# Altium schematic symbol library 2mmSch.SchLib: 2 symbols
Pins are listed as number, name and electrical type; pins without a type are passive.

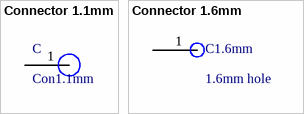
[diagram p0: symbols Connector 1.1mm to Connector 1.6mm]

## Connector 1.1mm
designator C, comment Con1.1mm
Connector Pad 1.1mm
footprint PCBComponent_1 - duplicate
pins: 1

## Connector 1.6mm
designator C1.6mm, comment 1.6mm hole
1.6mm Connector Hole
footprint PCBComponent_1
pins: 1